# Altium schematic symbol library RPI2354A_QFN60.SchLib: 1 symbol
Pins are listed as number, name and electrical type; pins without a type are passive.

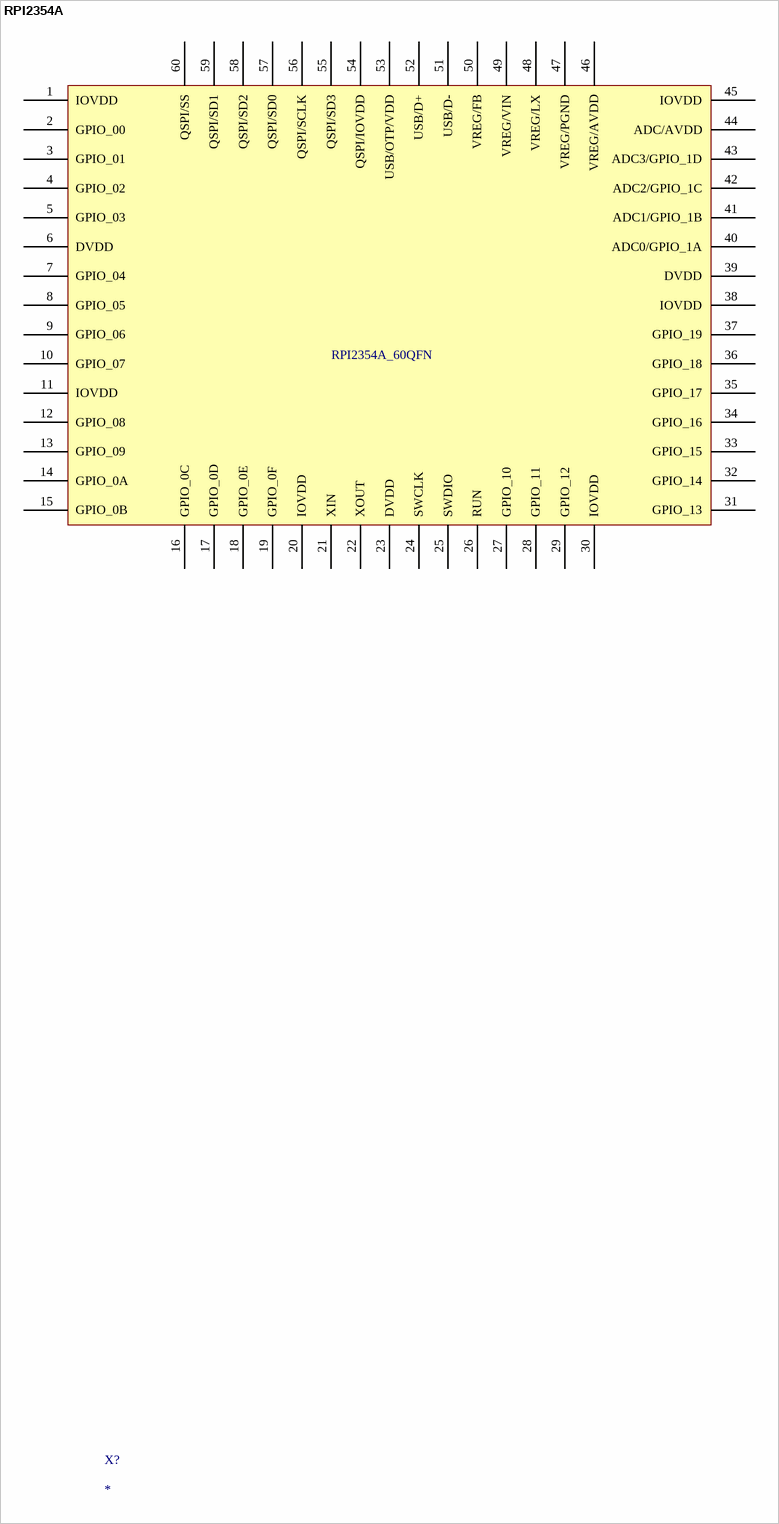
[diagram p0: symbol RPI2354A]

## RPI2354A
designator X?
pins: 1 IOVDD, 2 GPIO_00, 3 GPIO_01, 4 GPIO_02, 5 GPIO_03, 6 DVDD, 7 GPIO_04, 8 GPIO_05, 9 GPIO_06, 10 GPIO_07, 11 IOVDD, 12 GPIO_08, 13 GPIO_09, 14 GPIO_0A, 15 GPIO_0B, 16 GPIO_0C, 17 GPIO_0D, 18 GPIO_0E, 19 GPIO_0F, 20 IOVDD, 21 XIN, 22 XOUT, 23 DVDD, 24 SWCLK, 25 SWDIO, 26 RUN, 27 GPIO_10, 28 GPIO_11, 29 GPIO_12, 30 IOVDD, 31 GPIO_13, 32 GPIO_14, 33 GPIO_15, 34 GPIO_16, 35 GPIO_17, 36 GPIO_18, 37 GPIO_19, 38 IOVDD, 39 DVDD, 40 ADC0/GPIO_1A, 41 ADC1/GPIO_1B, 42 ADC2/GPIO_1C, 43 ADC3/GPIO_1D, 44 ADC/AVDD, 45 IOVDD, 46 VREG/AVDD, 47 VREG/PGND, 48 VREG/LX, 49 VREG/VIN, 50 VREG/FB, 51 USB/D-, 52 USB/D+, 53 USB/OTP/VDD, 54 QSPI/IOVDD, 55 QSPI/SD3, 56 QSPI/SCLK, 57 QSPI/SD0, 58 QSPI/SD2, 59 QSPI/SD1, 60 QSPI/SS
text: RPI2354A_60QFN